# Altium footprint library Footprint.PcbLib: 411 footprints (part 18 of 26)
Each footprint in its own frame and in the unit in brackets; x right, y up, seen from the top. Pads: shape width x height; smd on the part's side, far side on the other; paste and mask are expansions set on the pad; w line width, h text height; cw(c..) or ccw(c..) is an arc to the next point about the centre after c.
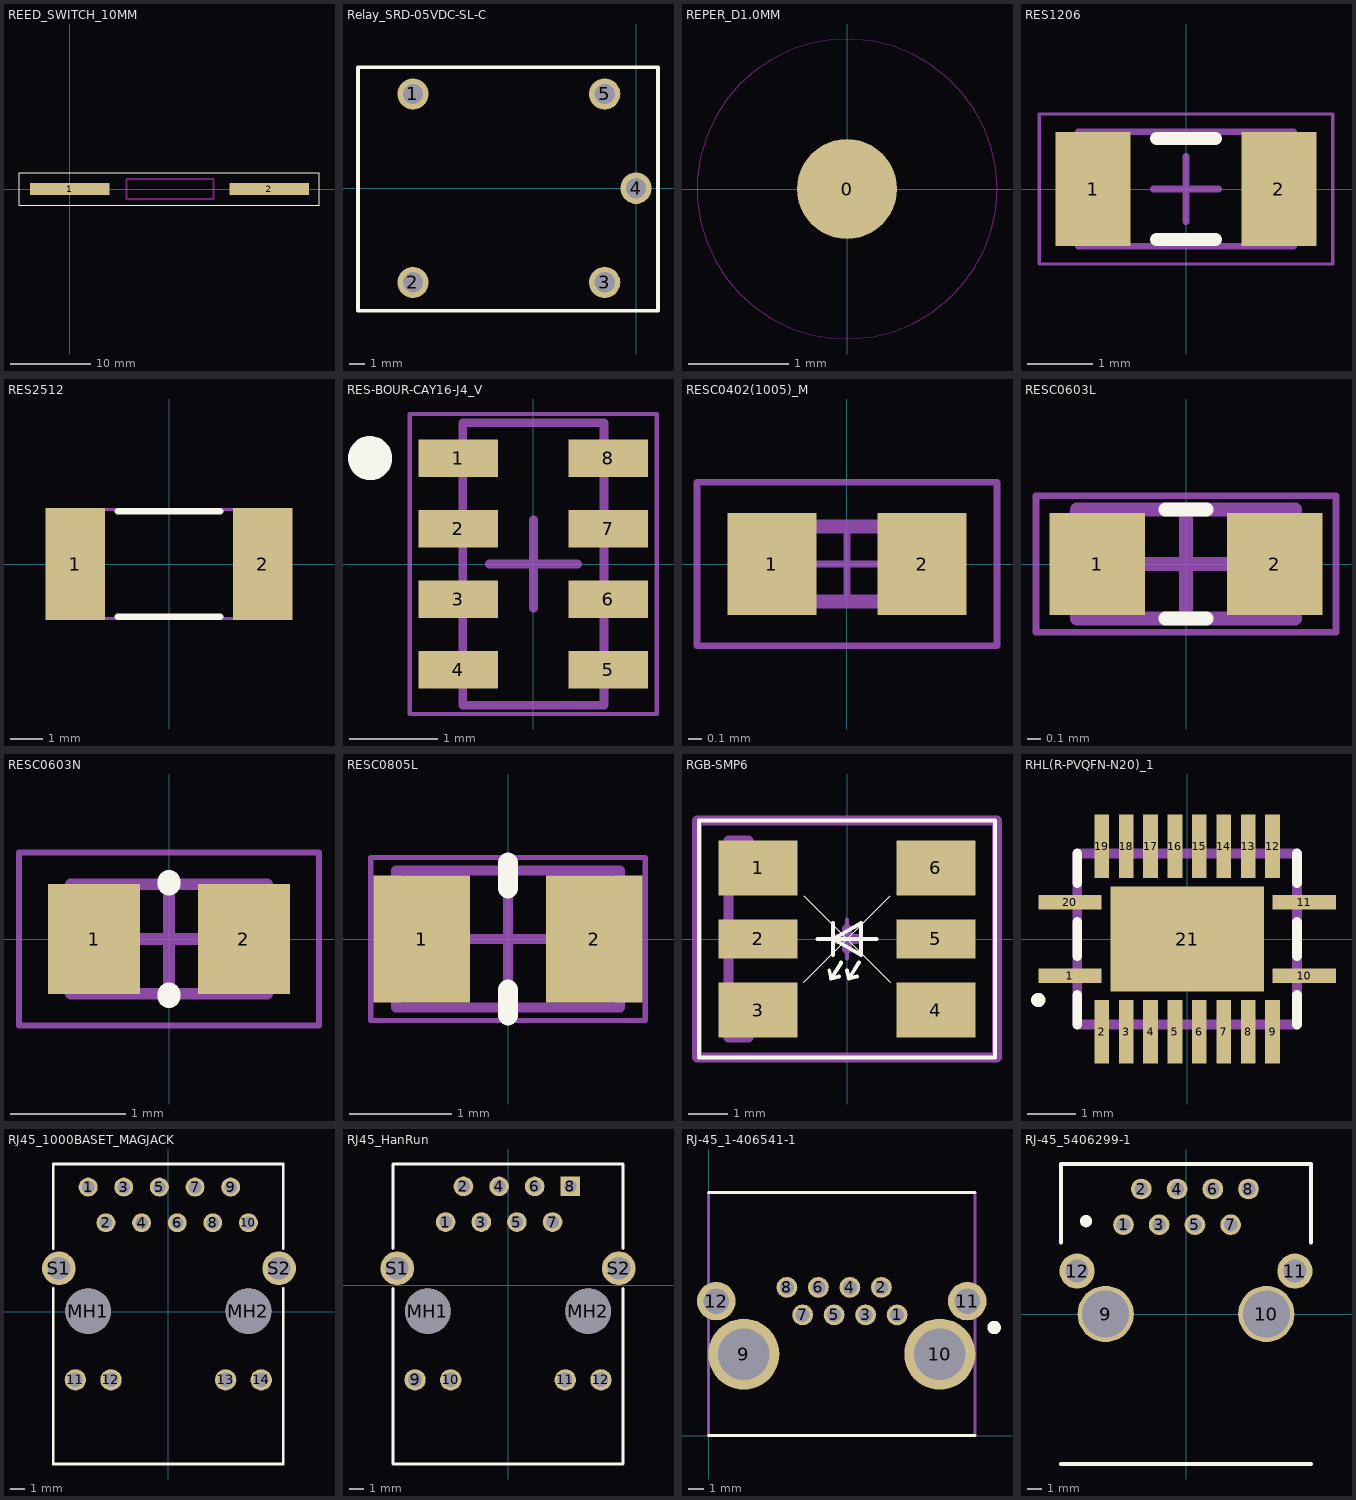
[diagram p17: the footprints below, top view; thin cyan lines are the x and y axes]

## REED_SWITCH_10MM [mm]
pads (2):
  rect 10x1.5 smd: 1(0,0) 2(25,0)
Top Overlay:
  lines w0.1: -6.35,-2.032 -6.35,2.032 31.242,2.032 31.242,-2.032 -6.35,-2.032
Keep-Out Layer:
  lines w0.254: 7.112,-1.27 7.112,1.27 18.034,1.27 18.034,-1.27 7.112,-1.27

## Relay_SRD-05VDC-SL-C [mm]
pads (5):
  round 2 hole 1.3: 1(-14.2,6) 2(-14.2,-6) 3(-2,-6) 4(0,0) 5(-2,6)
Top Overlay:
  lines w0.25: -17.7,-7.8 -17.7,7.7 1.4,7.7 1.4,-7.8 -17.7,-7.8
3D body "User Library-relay_songle.STEP": height 15.6, standoff -4.7, extent -17.707,-7.788 1.393,7.712

## REPER_D1.0MM [mm]
pads (1):
  round 1 smd paste-99 mask+1: 0(0,0)
Top Layer keep-out:
  circle w0.01: c0,0 r1.5

## RES1206 [mm] "Chip Resistor, 2-Leads, Body 3,15x1,60mm, IPC Medium Density"
height 0.6
pads (2):
  rect 1.15x1.75 smd: 1(-1.425,0) 2(1.425,0)
Top Overlay:
  lines w0.2: -0.45,-0.775 0.45,-0.775 ; -0.45,0.775 0.45,0.775
Mechanical 13:
  lines w0.1: -1.65,-0.875 1.65,-0.875 1.65,0.875 -1.65,0.875 -1.65,-0.875
Mechanical 15:
  lines w0.05: -2.25,-1.15 2.25,-1.15 2.25,1.15 -2.25,1.15 -2.25,-1.15
  lines w0.1: -0.5,0 0.5,0 ; 0,-0.5 0,0.5
3D body: height 0.6, standoff 0, extent 1.2,-0.875 1.65,0.875
3D body: height 0.6, standoff 0, extent -1.65,-0.875 -1.2,0.875
3D body: height 0.6, standoff 0, extent -1.2,-0.875 1.2,0.875

## RES2512 [mm] "Chip Resistor, 2-Leads, Body 6,40x3,20mm, IPC Low Density"
height 0.9
pads (2):
  rect 1.85x3.5 smd: 1(-2.925,0) 2(2.925,0)
Top Overlay:
  lines w0.2: -1.6,-1.65 1.6,-1.65 ; -1.6,1.65 1.6,1.65
Mechanical 1:
  lines w0.1: -3.3,-1.7 3.3,-1.7 3.3,1.7 -3.3,1.7 -3.3,-1.7
3D body: height 0.9, standoff 0, extent -2.4,-1.7 2.4,1.7
3D body: height 0.9, standoff 0, extent 2.4,-1.7 3.3,1.7
3D body: height 0.9, standoff 0, extent -3.3,-1.7 -2.4,1.7

## RES-BOUR-CAY16-J4_V [mm] "SMD, 8-Leads, Body 1.6x3.2mm, Pitch 0.8mm"
height 0.6
pads (8):
  rect 0.9x0.425 smd: 1(-0.85,1.2) 2(-0.85,0.4) 3(-0.85,-0.4) 4(-0.85,-1.2) 5(0.85,-1.2) 6(0.85,-0.4) 7(0.85,0.4) 8(0.85,1.2)
Top Overlay:
  circle w0.25: c-1.85,1.2 r0.125
Mechanical 13:
  lines w0.1: -0.8,-1.6 -0.8,1.6 0.8,1.6 0.8,-1.6 -0.8,-1.6
Mechanical 15:
  lines w0.05: -1.4,-1.7 -1.4,1.7 1.4,1.7 1.4,-1.7 -1.4,-1.7
  lines w0.1: -0.5,0 0.5,0 ; 0,-0.5 0,0.5
3D body "BOUR-CAY16-J4-8.stp": height 0.6, standoff 0, extent -0.8,-1.6 0.8,1.6

## RESC0402(1005)_M [mm] "Chip Resistor, Body 1.0x0.5mm, IPC Low Density"
height 0.4
pads (2):
  rect 0.65x0.75 smd: 1(-0.55,0) 2(0.55,0)
Mechanical 13:
  lines w0.1: -0.525,-0.275 -0.525,0.275 0.525,0.275 0.525,-0.275 -0.525,-0.275
Mechanical 15:
  lines w0.05: -0.275,0 0.275,0 ; 0,-0.275 0,0.275 ; -1.1,-0.6 -1.1,0.6 1.1,0.6 1.1,-0.6 -1.1,-0.6
3D body: height 0.4, standoff 0, extent -0.525,-0.275 -0.3,0.275
3D body: height 0.4, standoff 0, extent -0.3,-0.275 0.3,0.275
3D body: height 0.4, standoff 0, extent 0.3,-0.275 0.525,0.275

## RESC0603L [mm]
height 0.45
pads (2):
  rect 0.7x0.75 smd: 1(-0.65,0) 2(0.65,0)
Top Overlay:
  lines w0.1: -0.15,-0.4 0.15,-0.4 ; -0.15,0.4 0.15,0.4
Mechanical 15:
  lines w0.05: -1.1,-0.5 1.1,-0.5 1.1,0.5 -1.1,0.5 -1.1,-0.5
  lines w0.1: -0.4,0 0.4,0 ; 0,-0.4 0,0.4 ; -0.8,-0.4 0.8,-0.4 0.8,0.4 -0.8,0.4 -0.8,-0.4
  text ".Designator" at -1,0.75 h1.52
3D body "RESC0603.step": height 0.45, standoff 0, extent -0.8,-0.4 0.8,0.4

## RESC0603N [mm] "Chip Resistor, 2-Leads, Body 1,60x0,85mm, IPC Medium Density"
height 0.5
pads (2):
  rect 0.8x0.95 smd: 1(-0.65,0) 2(0.65,0)
Top Overlay:
  lines w0.2: 0,-0.5 0,-0.475 ; 0,0.475 0,0.5
Mechanical 13:
  lines w0.1: -0.85,-0.475 -0.85,0.475 0.85,0.475 0.85,-0.475 -0.85,-0.475
Mechanical 15:
  lines w0.05: -1.3,-0.75 -1.3,0.75 1.3,0.75 1.3,-0.75 -1.3,-0.75
  lines w0.1: -0.475,0 0.475,0 ; 0,-0.475 0,0.475
  text ".Designator" at -1.2,1 h1.52
3D body: height 0.5, standoff 0, extent -0.55,-0.475 0.55,0.475
3D body: height 0.5, standoff 0, extent -0.85,-0.475 -0.55,0.475
3D body: height 0.5, standoff 0, extent 0.55,-0.475 0.85,0.475

## RESC0805L [mm] "Chip Resistor, 2-Leads, Body 2,00x1,25mm, IPC High Density"
height 0.7
pads (2):
  rect 0.95x1.25 smd: 1(-0.85,0) 2(0.85,0)
Top Overlay:
  lines w0.2: 0,-0.75 0,-0.5 ; 0,0.5 0,0.75
Mechanical 13:
  lines w0.1: -1.1,-0.675 1.1,-0.675 1.1,0.675 -1.1,0.675 -1.1,-0.675
Mechanical 15:
  lines w0.05: -1.35,-0.8 1.35,-0.8 1.35,0.8 -1.35,0.8 -1.35,-0.8
  lines w0.1: -0.5,0 0.5,0 ; 0,-0.5 0,0.5
  text ".Designator" at -1.3,1 h1.52
3D body: height 0.7, standoff 0, extent 0.7,-0.675 1.1,0.675
3D body: height 0.7, standoff 0, extent -1.1,-0.675 -0.7,0.675
3D body: height 0.7, standoff 0, extent -0.7,-0.675 0.7,0.675

## RGB-SMP6 [mm]
pads (6):
  rect 2x1.4 smd: 1(-2.25,1.8) 3(-2.25,-1.8) 4(2.25,-1.8) 6(2.25,1.8)
  rect 2x1 smd: 2(-2.25,0) 5(2.25,0)
Top Overlay:
  lines w0.01: -1.1,-1.1 1.1,1.1 ; -1.1,1.1 1.1,-1.1
  lines w0.1: -0.75,0 0.75,0 ; -0.45,-0.8 -0.4,-1 ; -0.35,-0.4 -0.35,0.4 ; -0.2,-0.95 -0.4,-1 ; -0.15,-0.6 -0.4,-1 ; 0,-0.8 0.05,-1 ; 0.25,-0.95 0.05,-1 ; 0.3,-0.6 0.05,-1 ; -3.75,-3 3.75,-3 3.75,3 -3.75,3 -3.75,-3 ; -0.35,0 0.35,0.4 0.35,-0.4 -0.35,0
Mechanical 15:
  lines w0.1: -0.5,0 0.5,0 ; 0,-0.5 0,0.5
  lines w0.254: -2.5,-2.5 -3,-2.5 -3,2.5 -2.5,2.5 ; -3.8,-3 3.8,-3 3.8,3 -3.8,3 -3.8,-3 ; -0.254,0 0.254,0 -0.254,0 ; 0,-0.254 0,0.254 0,-0.254
  text ".Designator" at -3.5,3.5 h1.52
3D body "User Library-LED_RGB_5050.STEP": height 1.6, standoff 0, extent -2.825,-2.5 2.825,2.5

## RHL(R-PVQFN-N20)_1 [mm]
pads (21):
  rect 1.3x0.3 smd: 1(-2.4,-0.75) 10(2.4,-0.75) 11(2.4,0.75) 20(-2.4,0.75)
  rect 0.3x1.3 smd: 2(-1.75,-1.9) 3(-1.25,-1.9) 4(-0.75,-1.9) 5(-0.25,-1.9) 6(0.25,-1.9) 7(0.75,-1.9) 8(1.25,-1.9) 9(1.75,-1.9) 12(1.75,1.9) 13(1.25,1.9) 14(0.75,1.9) 15(0.25,1.9) 16(-0.25,1.9) 17(-0.75,1.9) 18(-1.25,1.9) 19(-1.75,1.9)
  rect 3.15x2.15 smd: 21(0,0)
Top Overlay:
  circle w0.2: c-3.05,-1.25 r0.046
  lines w0.2: -2.25,-1.75 -2.25,-1.15 ; -2.25,-0.35 -2.25,0.35 ; -2.25,1.15 -2.25,1.75 ; 2.25,-1.75 2.25,-1.15 ; 2.25,-0.35 2.25,0.35 ; 2.25,1.15 2.25,1.75
Mechanical 13:
  lines w0.2: -2.25,-1.75 -2.25,1.75 2.25,1.75 2.25,-1.75 -2.25,-1.75

## RJ45_1000BASET_MAGJACK [mm] "Chinese magjack for 1G copper Ethernet"
pads (18):
  round 1.35 hole 0.9: 1(-5.715,8.89) 2(-4.445,6.35) 3(-3.175,8.89) 4(-1.905,6.35) 5(-0.635,8.89) 6(0.635,6.35) 7(1.905,8.89) 8(3.175,6.35) 9(4.445,8.89) 10(5.715,6.35)
  round 1.52 hole 1.02: 11(-6.625,-4.85) 12(-4.085,-4.85) 13(4.085,-4.85) 14(6.625,-4.85)
  round 3.25 hole 3.25 unplated: MH1(-5.715,0.05) MH2(5.715,0.05)
  round 2.4 hole 1.63: S1(-7.8,3.1) S2(7.9,3.1)
Top Overlay:
  lines w0.2: -8.2,1.67 -8.2,-10.85 8.2,-10.85 8.2,1.67 ; -8.2,4.51 -8.2,10.536 -2.211,10.536 8.2,10.536 8.2,4.51
3D body "User Library-HR911105A.step": height 13.6, standoff -2.9, extent -8,-10.9 7.88,10.5

## RJ45_HanRun [mm] "LAN Transformer, body 25.3x16.2mm"
height 13.5
pads (16):
  round 1.4 hole 0.9: 1(-4.445,4.5) 2(-3.175,7.04) 3(-1.905,4.5) 4(-0.635,7.04) 5(0.635,4.5) 6(1.905,7.04) 7(3.175,4.5)
  rect 1.4x1.4 hole 0.9: 8(4.445,7.04)
  round 1.52 hole 1.02: 9(-6.625,-6.75) 10(-4.085,-6.75) 11(4.085,-6.75) 12(6.625,-6.75)
  round 3.25 hole 3.25 unplated: MH1(-5.715,-1.85) MH2(5.715,-1.85)
  round 2.4 hole 1.63: S1(-7.9,1.2) S2(7.9,1.2)
Top Overlay:
  lines w0.2: -8.2,-0.23 -8.2,-12.75 8.2,-12.75 8.2,-0.23 ; -8.2,2.61 -8.2,8.636 -2.211,8.636 8.2,8.636 8.2,2.61
3D body "User Library-HR911105A.step": height 13.6, standoff -2.9, extent -8,-12.8 7.88,8.6

## RJ-45_1-406541-1 [mm]
pads (12):
  round 1.35 hole 0.9: 1(12.215,7.82) 2(11.195,9.6) 3(10.175,7.82) 4(9.155,9.6) 5(8.135,7.82) 6(7.115,9.6) 7(6.095,7.82) 8(5.075,9.6)
  round 4.6 hole 3.33: 9(2.285,5.28) 10(14.985,5.28)
  round 2.5 hole 1.65: 11(16.765,8.71) 12(0.505,8.71)
Top Overlay:
  circle w0.5: c18.5,7 r0.185
  lines w0.2: 0,0 17.27,0 ; 0,15.75 17.27,15.75
Mechanical 1:
  lines w0.2: 0,0 0,15.75 17.27,15.75 17.27,0 0,0
3D body "1-406541-1.stp": height 14.6, standoff -4.15, extent -0.722,0 17.922,15.748

## RJ-45_5406299-1 [mm]
pads (12):
  round 1.47 hole 0.97: 1(-4.445,6.35) 2(-3.175,8.89) 3(-1.905,6.35) 4(-0.635,8.89) 5(0.635,6.35) 6(1.905,8.89) 7(3.175,6.35) 8(4.445,8.89)
  round 4 hole 3.33: 9(-5.715,0) 10(5.715,0)
  round 2.5 hole 1.65: 11(7.745,3.05) 12(-7.745,3.05)
Top Overlay:
  circle w0.5: c-7.112,6.604 r0.185
  lines w0.254: -8.89,-10.668 8.89,-10.668 ; -8.89,5.08 -8.89,10.668 8.89,10.668 8.89,5.08
3D body "5406299-1.stp": height 14.75, standoff -3.69, extent -8.867,-10.754 8.867,10.582